# Altium schematic symbol library BB-18.SchLib: 11 symbols
Pins are listed as number, name and electrical type; pins without a type are passive.

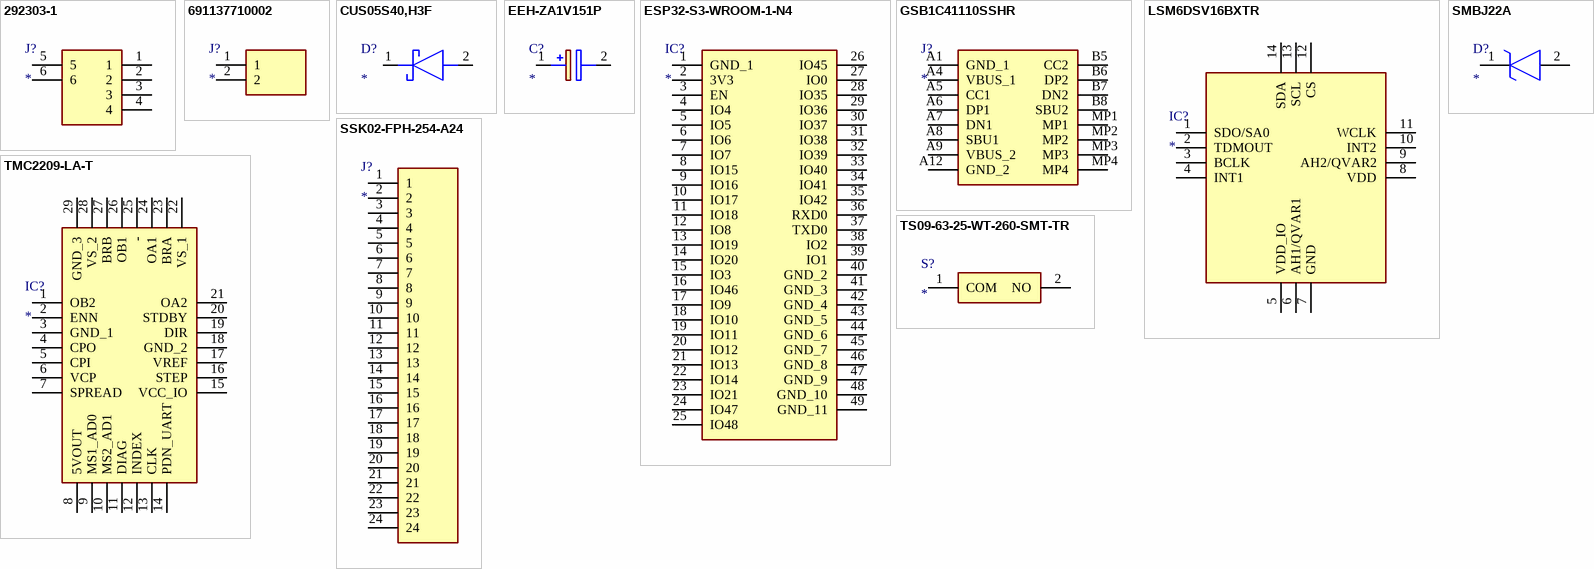
[diagram p0: symbols 292303-1 to TS09-63-25-WT-260-SMT-TR]

## 292303-1
designator J?
Connector; Manufacturer_Name: TE Connectivity; Manufacturer_Part_Number: 292303-1; Datasheet Link: https://datasheet.datasheetarchive.com/originals/distributors/Datasheets_SAMA/3e4c4de204b167d1a9250e6de251b7b8.pdf; Mouser Part Number: 571-292303-1; Mouser Price/Stock: https://www.mouser.co.uk/ProductDetail/TE-Connectivity/292303-1?qs=G%2F5vCLrg9vx2OsUPTgR%2F%252BQ%3D%3D; Arrow Part Number: 292303-1; Arrow Price/Stock: https://www.arrow.com/en/products/292303-1/te-connectivity.html?utm_currency=USD&region=europe
footprint TECONN-4POS-USB
pins: 1, 2, 3, 4, 5, 6

## 691137710002
designator J?
Connector; Manufacturer_Name: Wurth Elektronik; Manufacturer_Part_Number: 691137710002; Datasheet Link: https://www.we-online.com/catalog/datasheet/691137710002.pdf; Height: 11.5mm; Mouser Part Number: 710-691137710002; Mouser Price/Stock: https://www.mouser.co.uk/ProductDetail/Wurth-Elektronik/691137710002?qs=lBTPRtX1sU9LnHBbviNKGA%3D%3D
footprint SHDR2W70P0X500_1X2_1000X750X1150P
pins: 1, 2

## CUS05S40,H3F
designator D?
Schottky Diode; Manufacturer_Name: Toshiba; Manufacturer_Part_Number: CUS05S40,H3F; Datasheet Link: http://toshiba.semicon-storage.com/info/docget.jsp?did=14743&prodName=CUS05S40; Height: 1.1mm; Mouser Part Number: 757-CUS05S40H3F; Mouser Price/Stock: https://www.mouser.co.uk/ProductDetail/Toshiba/CUS05S40H3F?qs=cW4DzVrAanNdPcmUvyvUwQ%3D%3D; Arrow Part Number: CUS05S40,H3F; Arrow Price/Stock: https://www.arrow.com/en/products/cus05s40h3f/toshiba?utm_currency=USD&region=nac
footprint CUZ10V
pins: 1 K, 2 A

## EEH-ZA1V151P
designator C?
Capacitor Polarised; Manufacturer_Name: Panasonic; Manufacturer_Part_Number: EEH-ZA1V151P; Datasheet Link: http://industrial.panasonic.com/cdbs/www-data/pdf/RDD0000/ABA0000C1221.pdf; Height: 10.8mm; Mouser Part Number: 667-EEH-ZA1V151P; Mouser Price/Stock: https://www.mouser.co.uk/ProductDetail/Panasonic/EEH-ZA1V151P?qs=7UCyOFMWVHbEfsj1CtRV9Q%3D%3D
footprint EEHZA1H680P
pins: 1 +, 2 -

## ESP32-S3-WROOM-1-N4
designator IC?
Integrated Circuit; Manufacturer_Name: Espressif Systems; Manufacturer_Part_Number: ESP32-S3-WROOM-1-N4; Datasheet Link: https://www.espressif.com/sites/default/files/documentation/esp32-s3-wroom-1_wroom-1u_datasheet_en.pdf; Height: 3.25mm; Mouser Part Number: 356-ESP32-S3WROOM1N4; Mouser Price/Stock: https://www.mouser.co.uk/ProductDetail/Espressif-Systems/ESP32-S3-WROOM-1-N4?qs=Li%252BoUPsLEnsO%2FkiJOUK0FQ%3D%3D
footprint ESP32S3WROOM1N4
pins: 1 GND_1, 2 3V3, 3 EN, 4 IO4, 5 IO5, 6 IO6, 7 IO7, 8 IO15, 9 IO16, 10 IO17, 11 IO18, 12 IO8, 13 IO19, 14 IO20, 15 IO3, 16 IO46, 17 IO9, 18 IO10, 19 IO11, 20 IO12, 21 IO13, 22 IO14, 23 IO21, 24 IO47, 25 IO48, 26 IO45, 27 IO0, 28 IO35, 29 IO36, 30 IO37, 31 IO38, 32 IO39, 33 IO40, 34 IO41, 35 IO42, 36 RXD0, 37 TXD0, 38 IO2, 39 IO1, 40 GND_2, 41 GND_3, 42 GND_4, 43 GND_5, 44 GND_6, 45 GND_7, 46 GND_8, 47 GND_9, 48 GND_10, 49 GND_11

## GSB1C41110SSHR
designator J?
Connector; Manufacturer_Name: Amphenol Communications Solutions; Manufacturer_Part_Number: GSB1C41110SSHR; Datasheet Link: https://cdn.amphenol-cs.com/media/wysiwyg/files/drawing/gsb1c41x10sshr-ax1.pdf; Height: 3.41mm; Arrow Part Number: GSB1C41110SSHR; Arrow Price/Stock: https://www.arrow.com/en/products/gsb1c41110sshr/amphenol-fci.html?utm_currency=USD&region=asia
footprint GSB1C41110SSHR
pins: A1 GND_1, A4 VBUS_1, A5 CC1, A6 DP1, A7 DN1, A8 SBU1, A9 VBUS_2, A12 GND_2, B5 CC2, B6 DP2, B7 DN2, B8 SBU2, MP1, MP2, MP3, MP4

## LSM6DSV16BXTR
designator IC?
Integrated Circuit; Manufacturer_Name: STMicroelectronics; Manufacturer_Part_Number: LSM6DSV16BXTR; Datasheet Link: https://www.st.com/resource/en/datasheet/lsm6dsv16bx.pdf; Height: 0.74mm; Mouser Part Number: 511-LSM6DSV16BXTR; Mouser Price/Stock: https://www.mouser.co.uk/ProductDetail/STMicroelectronics/LSM6DSV16BXTR?qs=vvQtp7zwQdMXKB4RqH7GHQ%3D%3D; Arrow Part Number: LSM6DSV16BXTR; Arrow Price/Stock: https://www.arrow.com/en/products/lsm6dsv16bxtr/stmicroelectronics?utm_currency=USD&region=nac
footprint LSM6DSV16BXTR
pins: 1 SDO/SA0, 2 TDMOUT, 3 BCLK, 4 INT1, 5 VDD_IO, 6 AH1/QVAR1, 7 GND, 8 VDD, 9 AH2/QVAR2, 10 INT2, 11 WCLK, 12 CS, 13 SCL, 14 SDA

## SMBJ22A
designator D?
TVS Diode (Uni-directional); Manufacturer_Name: STMicroelectronics; Manufacturer_Part_Number: SMBJ22A; Datasheet Link: https://www.st.com/resource/en/datasheet/smbj12a.pdf; Height: 2.45mm
footprint SMBJ12A
pins: 1 K, 2 A

## SSK02-FPH-254-A24
designator J?
Connector; Manufacturer_Name: Same Sky; Manufacturer_Part_Number: SSK02-FPH-254-A24; Datasheet Link: https://www.sameskydevices.com/product/resource/ssk02-fph-254.pdf; Height: 8.7mm
footprint RHDR24W69P0X254_1X24_6146X250X870P
pins: 1, 2, 3, 4, 5, 6, 7, 8, 9, 10, 11, 12, 13, 14, 15, 16, 17, 18, 19, 20, 21, 22, 23, 24

## TMC2209-LA-T
designator IC?
Integrated Circuit; Manufacturer_Name: Analog Devices; Manufacturer_Part_Number: TMC2209-LA-T; Datasheet Link: https://www.analog.com/media/en/technical-documentation/data-sheets/TMC2209_datasheet_rev1.09.pdf; Height: 0.9mm; Mouser Part Number: 700-TMC2209-LA-T; Mouser Price/Stock: https://www.mouser.co.uk/ProductDetail/ADI-Trinamic/TMC2209-LA-T?qs=TiOZkKH1s2Qz5AVGoa6OOQ%3D%3D; Arrow Part Number: TMC2209-LA-T; Arrow Price/Stock: https://www.arrow.com/en/products/tmc2209-la-t/analog-devices.html?utm_currency=USD&region=nac
footprint QFN50P500X500X90-29N-D
pins: 1 OB2, 2 ENN, 3 GND_1, 4 CPO, 5 CPI, 6 VCP, 7 SPREAD, 8 5VOUT, 9 MS1_AD0, 10 MS2_AD1, 11 DIAG, 12 INDEX, 13 CLK, 14 PDN_UART, 15 VCC_IO, 16 STEP, 17 VREF, 18 GND_2, 19 DIR, 20 STDBY, 21 OA2, 22 VS_1, 23 BRA, 24 OA1, 25 -, 26 OB1, 27 BRB, 28 VS_2, 29 GND_3

## TS09-63-25-WT-260-SMT-TR
designator S?
Switch; Manufacturer_Name: Same Sky; Manufacturer_Part_Number: TS09-63-25-WT-260-SMT-TR; Datasheet Link: https://www.sameskydevices.com/product/resource/ts09.pdf; Height: 2.7mm; Mouser Part Number: 179-TS0925WT260SMTTR; Mouser Price/Stock: https://www.mouser.co.uk/ProductDetail/Same-Sky/TS09-63-25-WT-260-SMT-TR?qs=Rp5uXu7WBW9IcFK5UTCCFQ%3D%3D; Arrow Part Number: TS09-63-25-WT-260-SMT-TR; Arrow Price/Stock: https://www.arrow.com/en/products/ts09-63-25-wt-260-smt-tr/cui-devices?utm_currency=USD&region=nac
footprint TS096325WT260SMTTR
pins: 1 COM, 2 NO